# Altium footprint library PcbLib.PcbLib: 20 footprints (part 1 of 2)
Each footprint in its own frame and in the unit in brackets; x right, y up, seen from the top. Pads: shape width x height; smd on the part's side, far side on the other; paste and mask are expansions set on the pad; w line width, h text height; cw(c..) or ccw(c..) is an arc to the next point about the centre after c.
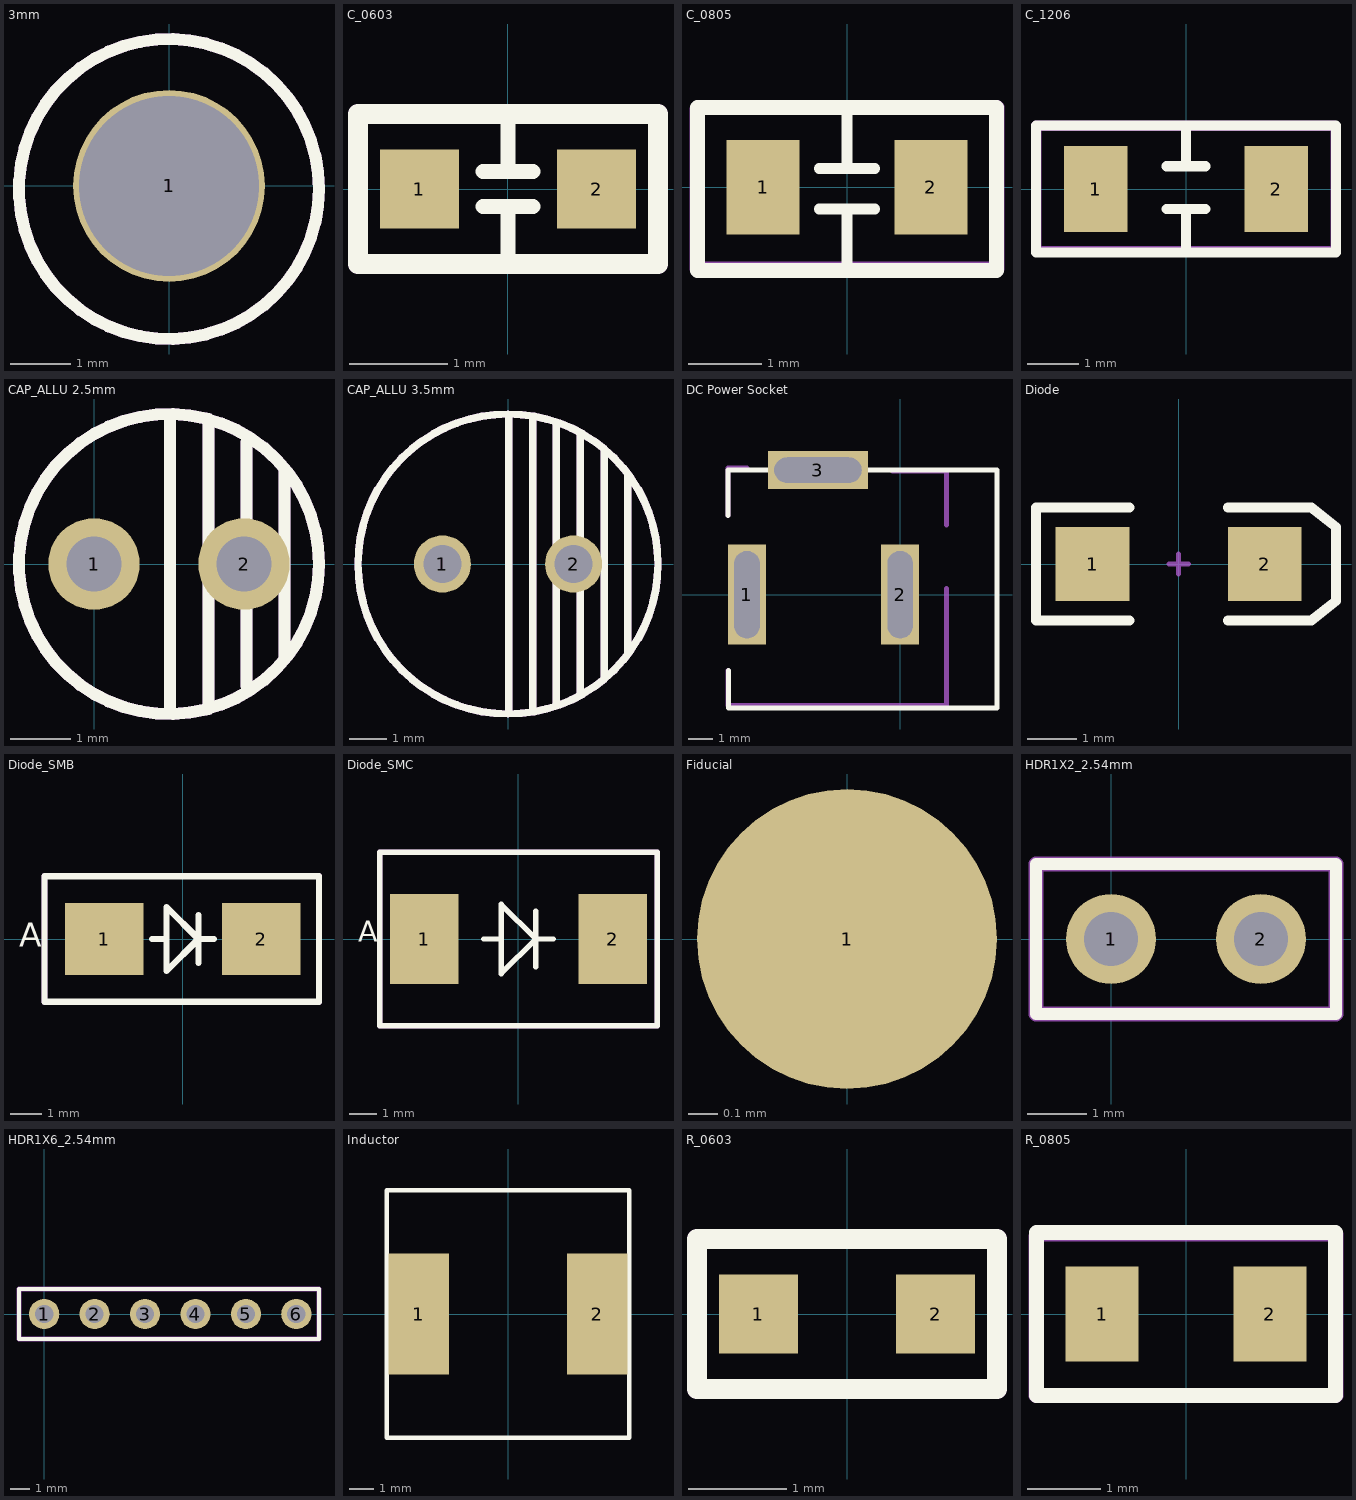
[diagram p0: the footprints below, top view; thin cyan lines are the x and y axes]

## 3mm [mm]
pads (1):
  round 3.2 hole 3: 1(0,0)
Top Overlay:
  circle w0.2: c0,-0.051 r2.5
Mechanical 29:
  circle w0.2: c0,-0.051 r2.5
  text ".Designator" at -1.905,-1.321 h0.6

## C_0603 [mm]
pads (2):
  rect 0.8x0.8 smd: 1(-0.9,0) 2(0.9,0)
Top Overlay:
  lines w0.15: -0.254,-0.178 0.254,-0.178 ; -0.254,0.178 0.254,0.178 ; 0,-0.762 0,-0.254 ; 0,0.254 0,0.762
  lines w0.2: -1.524,-0.762 -1.524,0.762 1.524,0.762 1.524,-0.762 -1.524,-0.762
Mechanical 29:
  lines w0.2: -1.524,-0.762 1.524,-0.762 1.524,0.762 -1.524,0.762 -1.524,-0.762
  text ".Designator" at -1.016,-0.254 h0.3
3D body "User Library-CAPC1608X09.step": height 0.9, standoff 0, extent -0.8,-0.4 0.8,0.4

## C_0805 [mm] "CAP SMD 0805"
pads (2):
  rect 1x1.3 smd: 1(-1.15,0) 2(1.15,0)
Top Overlay:
  lines w0.15: -0.381,-0.298 0.381,-0.298 ; -0.381,0.256 0.381,0.256 ; 0,-1.143 0,-0.305 ; 0,0.256 0,1.092
  lines w0.2: -2.05,-1.143 2.05,-1.143 ; -2.05,-1.117 -2.05,1.092 2.05,1.092 2.05,-1.117
Mechanical 29:
  lines w0.2: -2.057,1.067 -2.057,-1.118 2.057,-1.118 2.057,1.092 -2.032,1.092
  text ".Designator" at -0.94,-0.254 h1.27
3D body "User Library-CAPC2013X10.step": height 1, standoff 0, extent -1,-0.625 1,0.625

## C_1206 [mm] "CAP SMD 1206"
pads (2):
  rect 1.25x1.7 smd: 1(-1.775,0) 2(1.775,0)
Top Overlay:
  lines w0.2: -0.381,-0.391 0.381,-0.391 ; -0.381,0.447 0.381,0.447 ; 0,-1.245 0,-0.391 ; 0,0.457 0,1.235 ; -2.95,-1.25 2.95,-1.25 2.95,1.25 -2.95,1.25 -2.95,-1.25
Mechanical 29:
  lines w0.2: 2.921,1.245 -2.946,1.245 -2.946,-1.219 2.946,-1.219 2.946,1.219
  text ".Designator" at -1.549,-0.508 h1.27
3D body "User Library-CAPC3216X10.STEP": height 1, standoff 0, extent -1.6,-0.8 1.6,0.8

## CAP_ALLU 2.5mm [mil]
pads (2):
  round 60 hole 36: 1(0,0) 2(98.43,0)
Top Overlay:
  circle w7.87: c49.21,0 r98.43
  lines w7.87: 50,-95 50,95 ; 75,-95 75,95 ; 100,-80 100,80 ; 125,-60 125,60
Mechanical 29:
  circle w7.87: c49.21,0 r98.43
  lines w7.87: 50,-95 50,95 ; 75,-95 75,95 ; 100,-80 100,80 ; 125,-60 125,60
  text ".Designator" at -25,-25 h23.62
3D body "User Library-Cap electrolitic radial 6,3x12.STEP": height 503.94, standoff -27.56, extent -73.96,-124 173.98,124

## CAP_ALLU 3.5mm [mil]
pads (2):
  round 60 hole 40: 1(-68.9,0) 2(68.9,0)
Top Overlay:
  circle w7.87: c0,0 r157.48
  lines w7.87: 0.79,-155 0.79,155 ; 25.79,-155 25.79,155 ; 50.79,-145 50.79,145 ; 75.79,-135 75.79,135 ; 100.79,-120 100.79,120 ; 125.79,-95 125.79,95
Mechanical 29:
  circle w7.87: c0,0 r157.48
  lines w7.87: 0.79,-155 0.79,155 ; 25.79,-155 25.79,155 ; 50.79,-145 50.79,145 ; 75.79,-135 75.79,135 ; 100.79,-120 100.79,120 ; 125.79,-90 125.79,95
  text ".Designator" at -99.21,-50 h23.62
3D body "User Library-Cap electro 8x11_5x3_5mm.step": height 473.44, standoff -136.91, extent -156.96,-158.48 160,158.48

## DC Power Socket [mil]
pads (3):
  rect 60x158 hole 40 slot 137.8 at 90 deg: 1(-242.13,0) 2(0,0)
  rect 158x60 hole 40 slot 137.8 at 0 deg: 3(-129.92,196.85)
Top Overlay:
  lines w7.87: -272.13,125 -272.13,197 ; -271.63,-120 -271.63,-179 ; -246.13,197 -270.13,197 153,197 153,-179 -271.63,-179 ; -12.13,197 72.83,197 ; 72.83,-179 -271.63,-179
Mechanical 29:
  lines w7.87: -272.13,-120 -272.13,-175 72.87,-175 72.87,10 ; -272.13,125 -272.13,200 -242.13,200 ; -12.13,195 72.87,195 72.87,110
  text ".Designator" at -217.13,75 h23.62
3D body "SW3dPS-dc range - dc connector[4840.2201].STEP": height 433.07, standoff -137.8, extent -246.13,-177.11 298.22,197.12

## Diode [mm] "SMT LED; 2 Flat Leads"
height 1.2
pads (2):
  rect 1.5x1.5 smd: 1(-1.75,0) 2(1.75,0)
Top Overlay:
  lines w0.2: -1,-1.15 -2.9,-1.15 -2.9,1.15 -1,1.15 ; 1,-1.15 2.7,-1.15 3.2,-0.75 3.2,0.75 2.7,1.15 1,1.15
Mechanical 1:
  lines w0.1: -0.2,0 0.2,0 ; 0,-0.2 0,0.2

## Diode_SMB [mm]
pads (2):
  rect 2.5x2.3 smd: 1(-2.5,0) 2(2.5,0)
Top Overlay:
  lines w0.2: -0.965,0 -0.508,0 ; 0.508,-0.762 0.508,0 ; 0.508,0.762 0.508,0 ; 0.991,0 0.508,0 ; 0.508,0 -0.508,-1.016 -0.508,1.016 0.508,0 ; -4.394,-2 -4.394,2 4.343,2 4.343,-2 -4.394,-2
  text "A" at -5.207,-0.254 h0.76
Mechanical 29:
  lines w0.2: -4.394,-2.007 4.343,-2.007 4.343,2.007 -4.394,2.007 -4.394,-2.007
  text ".Designator" at -2.54,-0.635 h0.6
3D body "b340a-13-f.stp": height 2.18, standoff 0, extent -2.623,-1.36 2.572,1.245

## Diode_SMC [mm]
pads (2):
  rect 2.5x3.3 smd: 1(-3.45,0) 2(3.45,0)
Top Overlay:
  lines w0.2: -1.27,0 -0.635,0 ; 0.635,-1.016 0.635,1.016 ; 1.27,0 0.635,0 ; 0.635,0 -0.635,-1.27 -0.635,1.27 0.635,0 ; -5.08,-3.175 -5.08,3.175 5.08,3.175 5.08,-3.175 -5.08,-3.175
  text "A" at -5.867,-0.102 h0.76
Mechanical 29:
  lines w0.2: -5.08,-3.175 -5.08,3.175 5.08,3.175 5.08,-3.175 -5.08,-3.175
  text ".Designator" at -4.064,-0.889 h0.6
3D body "User Library-DO-214AB(SMC).STEP": height 2.77, standoff 0.13, extent -3.937,-3.124 4.191,3.175

## Fiducial [mil]
pads (1):
  round 40 smd mask+40: 1(0,0)

## HDR1X2_2.54mm [mil] "Connector; Header; 4 Position"
pads (2):
  round 60 hole 36: 1(0,0) 2(100,0)
Top Overlay:
  lines w7.87: -50,-50 -50,50 150,50 150,-50 -50,-50
Mechanical 29:
  lines w10: -50,-50 150,-50 150,50 -50,50 -50,-50
  text ".Designator" at -40,-30 h23.62
3D body "User Library-RM254_2pin.STEP": height 237.51, standoff -121.54, extent -49,-50 151,50

## HDR1X6_2.54mm [mil] "Connector; Header; 6 Position"
pads (6):
  round 60 hole 36: 1(0,0) 2(100,0) 3(200,0) 4(300,0) 5(400,0) 6(500,0)
Top Overlay:
  lines w7.87: -50,-50 545,-50 545,50 -50,50 -50,-50
Mechanical 29:
  lines w10: -50,-50 545,-50 545,50 -50,50 -50,-50
  text ".Designator" at -40,-30 h23.62

## Inductor [mm] "Inductor 10.20 x 10"
pads (2):
  rect 2.5x5 smd: 1(-3.683,0) 2(3.683,0)
Top Overlay:
  lines w0.2: -5,-5.1 -5,5.1 5,5.1 5,-5.1 -5,-5.1
3D body: height 5.1, standoff 0, extent -4.826,-4.953 4.826,4.953

## R_0603 [mm] "RES SMD 0603"
pads (2):
  rect 0.8x0.8 smd: 1(-0.9,0) 2(0.9,0)
Top Overlay:
  lines w0.2: -1.524,-0.762 1.524,-0.762 1.524,0.762 -1.524,0.762 -1.524,-0.762
Mechanical 29:
  lines w0.2: -1.524,-0.762 -1.524,0.762 1.524,0.762 1.524,-0.762 -1.524,-0.762
  text ".Designator" at -1.016,-0.254 h0.3
3D body "User Library-res0603-1.step": height 0.4, standoff 0, extent -0.8,-0.4 0.8,0.4

## R_0805 [mm] "RES SMD 0805"
pads (2):
  rect 1x1.3 smd: 1(-1.15,0) 2(1.15,0)
Top Overlay:
  lines w0.2: -2.05,1.092 -2.05,-1.117 2.05,-1.118 2.05,1.092 ; -2.05,1.118 2.05,1.118
Mechanical 29:
  lines w0.2: -2.057,1.067 -2.057,-1.118 2.057,-1.118 2.057,1.092 -2.032,1.092
  text ".Designator" at -1.448,-0.279 h1.27
3D body "User Library-res0805-1.step": height 0.5, standoff 0, extent -1,-0.625 1,0.625